# Altium footprint library Connector-VH.PcbLib: 45 footprints (part 1 of 3)
Each footprint in its own frame and in the unit in brackets; x right, y up, seen from the top. Pads: shape width x height; smd on the part's side, far side on the other; paste and mask are expansions set on the pad; w line width, h text height; cw(c..) or ccw(c..) is an arc to the next point about the centre after c.
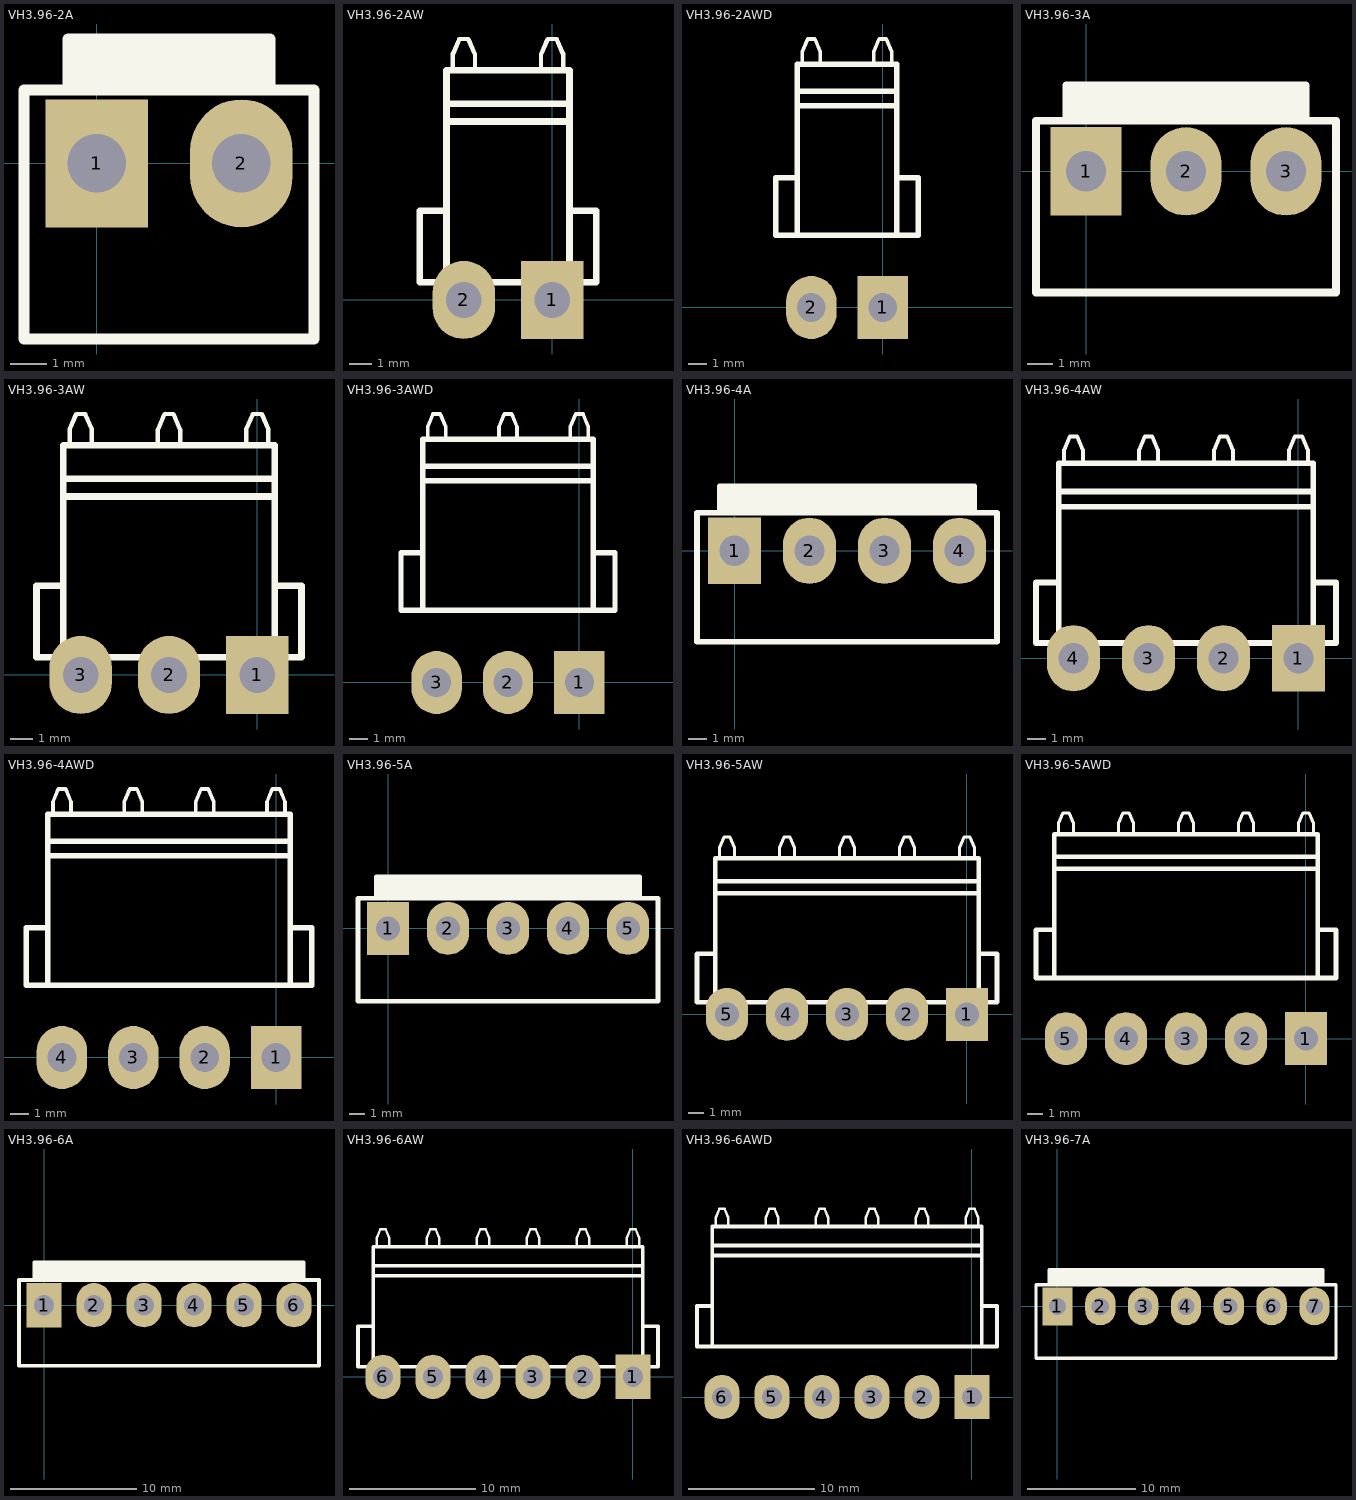
[diagram p0: the footprints below, top view; thin cyan lines are the x and y axes]

## VH3.96-2A [mm]
pads (2):
  rect 2.8x3.5 hole 1.6: 1(0,0)
  oval 2.8x3.5 hole 1.6: 2(3.96,0)
Top Overlay:
  lines w0.3: -0.78,2 -0.78,3.4 4.74,3.4 4.74,2 ; -0.78,2.286 4.74,2.286 ; -0.78,2.413 4.74,2.413 ; -0.78,2.667 4.74,2.667 ; -0.78,2.921 4.74,2.921 ; -0.78,3.175 4.74,3.175 ; -1.98,-4.8 -1.98,2 5.94,2 5.94,-4.8 -1.98,-4.8
3D body "VH3.96-2A.STEP": height 14.6, standoff -3.6, extent -1.98,-4.8 5.94,3.6

## VH3.96-2AW [mm]
pads (2):
  rect 2.8x3.5 hole 1.6: 1(0,0)
  oval 2.8x3.5 hole 1.6: 2(-3.96,0)
Top Overlay:
  lines w0.2: -4.46,10.3 -4.46,11 -4.16,11.7 -3.76,11.7 -3.46,11 -3.46,10.3 ; -0.5,10.3 -0.5,11 -0.2,11.7 0.2,11.7 0.5,11 0.5,10.3
  lines w0.3: -4.74,0.8 -4.74,10.3 0.78,10.3 0.78,0.8 ; -4.74,4 -5.94,4 -5.94,0.8 1.98,0.8 1.98,4 0.78,4 ; -4.74,8 0.78,8 ; -4.74,8.8 0.78,8.8
3D body "VH3.96-2AW.STEP": height 8.4, standoff -3.6, extent -5.94,-0.55 1.98,11.7

## VH3.96-2AWD [mm]
pads (2):
  rect 2.8x3.5 hole 1.6: 1(0,0)
  oval 2.8x3.5 hole 1.6: 2(-3.96,0)
Top Overlay:
  lines w0.2: -4.46,13.5 -4.46,14.2 -4.16,14.9 -3.76,14.9 -3.46,14.2 -3.46,13.5 ; -0.5,13.5 -0.5,14.2 -0.2,14.9 0.2,14.9 0.5,14.2 0.5,13.5
  lines w0.3: -4.74,4 -4.74,13.5 0.78,13.5 0.78,4 ; -4.74,7.2 -5.94,7.2 -5.94,4 1.98,4 1.98,7.2 0.78,7.2 ; -4.74,11.2 0.78,11.2 ; -4.74,12 0.78,12
3D body "VH3.96-2AWD.STEP": height 8.4, standoff -3.6, extent -5.94,-0.55 1.98,14.9

## VH3.96-3A [mm]
pads (3):
  rect 2.8x3.5 hole 1.6: 1(0,0)
  oval 2.8x3.5 hole 1.6: 2(3.96,0) 3(7.92,0)
Top Overlay:
  lines w0.3: -0.78,2 -0.78,3.4 8.7,3.4 8.7,2 ; -0.78,2.286 8.7,2.286 ; -0.78,2.413 8.7,2.413 ; -0.78,2.667 8.7,2.667 ; -0.78,2.921 8.7,2.921 ; -0.78,3.175 8.7,3.175 ; -1.98,-4.8 -1.98,2 9.9,2 9.9,-4.8 -1.98,-4.8
3D body "VH3.96-3A.STEP": height 14.6, standoff -3.6, extent -1.98,-4.8 9.9,3.6

## VH3.96-3AW [mm]
pads (3):
  rect 2.8x3.5 hole 1.6: 1(0,0)
  oval 2.8x3.5 hole 1.6: 2(-3.96,0) 3(-7.92,0)
Top Overlay:
  lines w0.2: -8.42,10.3 -8.42,11 -8.12,11.7 -7.72,11.7 -7.42,11 -7.42,10.3 ; -4.46,10.3 -4.46,11 -4.16,11.7 -3.76,11.7 -3.46,11 -3.46,10.3 ; -0.5,10.3 -0.5,11 -0.2,11.7 0.2,11.7 0.5,11 0.5,10.3
  lines w0.3: -8.7,0.8 -8.7,10.3 0.78,10.3 0.78,0.8 ; -8.7,4 -9.9,4 -9.9,0.8 1.98,0.8 1.98,4 0.78,4 ; -8.7,8 0.78,8 ; -8.7,8.8 0.78,8.8
3D body "VH3.96-3AW.STEP": height 8.4, standoff -3.6, extent -9.9,-0.55 1.98,11.7

## VH3.96-3AWD [mm]
pads (3):
  rect 2.8x3.5 hole 1.6: 1(0,0)
  oval 2.8x3.5 hole 1.6: 2(-3.96,0) 3(-7.92,0)
Top Overlay:
  lines w0.2: -8.42,13.5 -8.42,14.2 -8.12,14.9 -7.72,14.9 -7.42,14.2 -7.42,13.5 ; -4.46,13.5 -4.46,14.2 -4.16,14.9 -3.76,14.9 -3.46,14.2 -3.46,13.5 ; -0.5,13.5 -0.5,14.2 -0.2,14.9 0.2,14.9 0.5,14.2 0.5,13.5
  lines w0.3: -8.7,4 -8.7,13.5 0.78,13.5 0.78,4 ; -8.7,7.2 -9.9,7.2 -9.9,4 1.98,4 1.98,7.2 0.78,7.2 ; -8.7,11.2 0.78,11.2 ; -8.7,12 0.78,12
3D body "VH3.96-3AW.STEP": height 8.4, standoff -3.6, extent -9.9,-0.55 1.98,14.9

## VH3.96-4A [mm]
pads (4):
  rect 2.8x3.5 hole 1.6: 1(0,0)
  oval 2.8x3.5 hole 1.6: 2(3.96,0) 3(7.92,0) 4(11.88,0)
Top Overlay:
  lines w0.3: -0.78,2 -0.78,3.4 12.66,3.4 12.66,2 ; -0.78,2.159 12.66,2.159 ; -0.78,2.413 12.66,2.413 ; -0.78,2.667 12.66,2.667 ; -0.78,2.921 12.66,2.921 ; -0.78,3.175 12.66,3.175 ; -1.98,-4.8 13.86,-4.8 13.86,2 -1.98,2 -1.98,-4.8
3D body "VH3.96-4A.STEP": height 14.6, standoff -3.6, extent -1.98,-4.8 13.86,3.6

## VH3.96-4AW [mm]
pads (4):
  rect 2.8x3.5 hole 1.6: 1(0,0)
  oval 2.8x3.5 hole 1.6: 2(-3.96,0) 3(-7.92,0) 4(-11.88,0)
Top Overlay:
  lines w0.2: -12.38,10.3 -12.38,11 -12.08,11.7 -11.68,11.7 -11.38,11 -11.38,10.3 ; -8.42,10.3 -8.42,11 -8.12,11.7 -7.72,11.7 -7.42,11 -7.42,10.3 ; -4.46,10.3 -4.46,11 -4.16,11.7 -3.76,11.7 -3.46,11 -3.46,10.3 ; -0.5,10.3 -0.5,11 -0.2,11.7 0.2,11.7 0.5,11 0.5,10.3
  lines w0.3: -12.66,0.8 -12.66,10.3 0.78,10.3 0.78,0.8 ; -12.66,4 -13.86,4 -13.86,0.8 1.98,0.8 1.98,4 0.78,4 ; -12.66,8 0.78,8 ; -12.66,8.8 0.78,8.8
3D body "VH3.96-4AW.STEP": height 8.4, standoff -3.6, extent -13.86,-0.55 1.98,11.7

## VH3.96-4AWD [mm]
pads (4):
  rect 2.8x3.5 hole 1.6: 1(0,0)
  oval 2.8x3.5 hole 1.6: 2(-3.96,0) 3(-7.92,0) 4(-11.88,0)
Top Overlay:
  lines w0.2: -12.38,13.5 -12.38,14.2 -12.08,14.9 -11.68,14.9 -11.38,14.2 -11.38,13.5 ; -8.42,13.5 -8.42,14.2 -8.12,14.9 -7.72,14.9 -7.42,14.2 -7.42,13.5 ; -4.46,13.5 -4.46,14.2 -4.16,14.9 -3.76,14.9 -3.46,14.2 -3.46,13.5 ; -0.5,13.5 -0.5,14.2 -0.2,14.9 0.2,14.9 0.5,14.2 0.5,13.5
  lines w0.3: -12.66,4 -12.66,13.5 0.78,13.5 0.78,4 ; -12.66,7.2 -13.86,7.2 -13.86,4 1.98,4 1.98,7.2 0.78,7.2 ; -12.66,11.2 0.78,11.2 ; -12.66,12 0.78,12
3D body "VH3.96-4AW.STEP": height 8.4, standoff -3.6, extent -13.86,-0.55 1.98,14.9

## VH3.96-5A [mm]
pads (5):
  rect 2.8x3.5 hole 1.6: 1(0,0)
  oval 2.8x3.5 hole 1.6: 2(3.96,0) 3(7.92,0) 4(11.88,0) 5(15.84,0)
Top Overlay:
  lines w0.3: -0.78,2 -0.78,3.4 16.62,3.4 16.62,2 ; -0.78,2.159 16.62,2.159 ; -0.78,2.413 16.62,2.413 ; -0.78,2.667 16.62,2.667 ; -0.78,2.921 16.62,2.921 ; -0.78,3.175 16.62,3.175 ; -1.98,-4.8 17.82,-4.8 17.82,2 -1.98,2 -1.98,-4.8
3D body "VH3.96-5A.STEP": height 14.6, standoff -3.6, extent -1.98,-4.8 17.82,3.6

## VH3.96-5AW [mm]
pads (5):
  rect 2.8x3.5 hole 1.6: 1(0,0)
  oval 2.8x3.5 hole 1.6: 2(-3.96,0) 3(-7.92,0) 4(-11.88,0) 5(-15.84,0)
Top Overlay:
  lines w0.2: -16.34,10.3 -16.34,11 -16.04,11.7 -15.64,11.7 -15.34,11 -15.34,10.3 ; -12.38,10.3 -12.38,11 -12.08,11.7 -11.68,11.7 -11.38,11 -11.38,10.3 ; -8.42,10.3 -8.42,11 -8.12,11.7 -7.72,11.7 -7.42,11 -7.42,10.3 ; -4.46,10.3 -4.46,11 -4.16,11.7 -3.76,11.7 -3.46,11 -3.46,10.3 ; -0.5,10.3 -0.5,11 -0.2,11.7 0.2,11.7 0.5,11 0.5,10.3
  lines w0.3: -16.62,0.8 -16.62,10.3 0.78,10.3 0.78,0.8 ; -16.62,4 -17.82,4 -17.82,0.8 1.98,0.8 1.98,4 0.78,4 ; -16.62,8 0.78,8 ; -16.62,8.8 0.78,8.8
3D body "VH3.96-5AW.STEP": height 8.4, standoff -3.6, extent -17.82,-0.55 1.98,11.7

## VH3.96-5AWD [mm]
pads (5):
  rect 2.8x3.5 hole 1.6: 1(0,0)
  oval 2.8x3.5 hole 1.6: 2(-3.96,0) 3(-7.92,0) 4(-11.88,0) 5(-15.84,0)
Top Overlay:
  lines w0.2: -16.34,13.5 -16.34,14.2 -16.04,14.9 -15.64,14.9 -15.34,14.2 -15.34,13.5 ; -12.38,13.5 -12.38,14.2 -12.08,14.9 -11.68,14.9 -11.38,14.2 -11.38,13.5 ; -8.42,13.5 -8.42,14.2 -8.12,14.9 -7.72,14.9 -7.42,14.2 -7.42,13.5 ; -4.46,13.5 -4.46,14.2 -4.16,14.9 -3.76,14.9 -3.46,14.2 -3.46,13.5 ; -0.5,13.5 -0.5,14.2 -0.2,14.9 0.2,14.9 0.5,14.2 0.5,13.5
  lines w0.3: -16.62,4 -16.62,13.5 0.78,13.5 0.78,4 ; -16.62,7.2 -17.82,7.2 -17.82,4 1.98,4 1.98,7.2 0.78,7.2 ; -16.62,11.2 0.78,11.2 ; -16.62,12 0.78,12
3D body "VH3.96-5AW.STEP": height 8.4, standoff -3.6, extent -17.82,-0.55 1.98,14.9

## VH3.96-6A [mm]
pads (6):
  rect 2.8x3.5 hole 1.6: 1(0,0)
  oval 2.8x3.5 hole 1.6: 2(3.96,0) 3(7.92,0) 4(11.88,0) 5(15.84,0) 6(19.8,0)
Top Overlay:
  lines w0.3: -0.78,2 -0.78,3.4 20.58,3.4 20.58,2 ; -0.78,2.159 20.58,2.159 ; -0.78,2.413 20.58,2.413 ; -0.78,2.667 20.58,2.667 ; -0.78,2.921 20.58,2.921 ; -0.78,3.175 20.58,3.175 ; -1.98,-4.8 -1.98,2 21.78,2 21.78,-4.8 -1.98,-4.8
3D body "VH3.96-6A.STEP": height 14.6, standoff -3.6, extent -1.98,-4.8 21.78,3.6

## VH3.96-6AW [mm]
pads (6):
  rect 2.8x3.5 hole 1.6: 1(0,0)
  oval 2.8x3.5 hole 1.6: 2(-3.96,0) 3(-7.92,0) 4(-11.88,0) 5(-15.84,0) 6(-19.8,0)
Top Overlay:
  lines w0.2: -20.3,10.3 -20.3,11 -20,11.7 -19.6,11.7 -19.3,11 -19.3,10.3 ; -16.34,10.3 -16.34,11 -16.04,11.7 -15.64,11.7 -15.34,11 -15.34,10.3 ; -12.38,10.3 -12.38,11 -12.08,11.7 -11.68,11.7 -11.38,11 -11.38,10.3 ; -8.42,10.3 -8.42,11 -8.12,11.7 -7.72,11.7 -7.42,11 -7.42,10.3 ; -4.46,10.3 -4.46,11 -4.16,11.7 -3.76,11.7 -3.46,11 -3.46,10.3 ; -0.5,10.3 -0.5,11 -0.2,11.7 0.2,11.7 0.5,11 0.5,10.3
  lines w0.3: -20.58,0.8 -20.58,10.3 0.78,10.3 0.78,0.8 ; -20.58,4 -21.78,4 -21.78,0.8 1.98,0.8 1.98,4 0.78,4 ; -20.58,8 0.78,8 ; -20.58,8.8 0.78,8.8
3D body "VH3.96-6AW.STEP": height 8.4, standoff -3.6, extent -21.78,-0.55 1.98,11.7

## VH3.96-6AWD [mm]
pads (6):
  rect 2.8x3.5 hole 1.6: 1(0,0)
  oval 2.8x3.5 hole 1.6: 2(-3.96,0) 3(-7.92,0) 4(-11.88,0) 5(-15.84,0) 6(-19.8,0)
Top Overlay:
  lines w0.2: -20.3,13.5 -20.3,14.2 -20,14.9 -19.6,14.9 -19.3,14.2 -19.3,13.5 ; -16.34,13.5 -16.34,14.2 -16.04,14.9 -15.64,14.9 -15.34,14.2 -15.34,13.5 ; -12.38,13.5 -12.38,14.2 -12.08,14.9 -11.68,14.9 -11.38,14.2 -11.38,13.5 ; -8.42,13.5 -8.42,14.2 -8.12,14.9 -7.72,14.9 -7.42,14.2 -7.42,13.5 ; -4.46,13.5 -4.46,14.2 -4.16,14.9 -3.76,14.9 -3.46,14.2 -3.46,13.5 ; -0.5,13.5 -0.5,14.2 -0.2,14.9 0.2,14.9 0.5,14.2 0.5,13.5
  lines w0.3: -20.58,4 -20.58,13.5 0.78,13.5 0.78,4 ; -20.58,7.2 -21.78,7.2 -21.78,4 1.98,4 1.98,7.2 0.78,7.2 ; -20.58,11.2 0.78,11.2 ; -20.58,12 0.78,12
3D body "VH3.96-6AW.STEP": height 8.4, standoff -3.6, extent -21.78,-0.55 1.98,14.9

## VH3.96-7A [mm]
pads (7):
  rect 2.8x3.5 hole 1.6: 1(0,0)
  oval 2.8x3.5 hole 1.6: 2(3.96,0) 3(7.92,0) 4(11.88,0) 5(15.84,0) 6(19.8,0) 7(23.76,0)
Top Overlay:
  lines w0.3: -0.78,2 -0.78,3.4 24.54,3.4 24.54,2 ; -0.78,2.159 24.54,2.159 ; -0.78,2.413 24.54,2.413 ; -0.78,2.667 24.54,2.667 ; -0.78,2.921 24.54,2.921 ; -0.78,3.175 24.54,3.175 ; -1.98,-4.8 -1.98,2 25.74,2 25.74,-4.8 -1.98,-4.8
3D body "VH3.96-7A.STEP": height 14.6, standoff -3.6, extent -1.98,-4.8 25.74,3.6